# Altium integrated library BUZZER.IntLib: 1 symbol
Pins are listed as number, name and electrical type; pins without a type are passive.

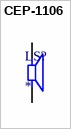
[diagram p0: symbol CEP-1106]

## CEP-1106
designator LS?
22.8 mm, 30 V, 88 dB, Through Hole, Piezo Audio Transducer Buzzer; MF: Same Sky; SnapEDA_Link: https://www.snapeda.com/parts/CEP-1106/Same+Sky/view-part/?ref=snap; Package: None; Value: *; MP: CEP-1106; Check_prices: https://www.snapeda.com/parts/CEP-1106/Same+Sky/view-part/?ref=eda
footprint CUI_CEP-1106
pins: 1, 2